# Altium footprint library ICs_VendorSpecific.PcbLib: 247 footprints (part 6 of 19)
Each footprint in its own frame and in the unit in brackets; x right, y up, seen from the top. Pads: shape width x height; smd on the part's side, far side on the other; paste and mask are expansions set on the pad; w line width, h text height; cw(c..) or ccw(c..) is an arc to the next point about the centre after c.
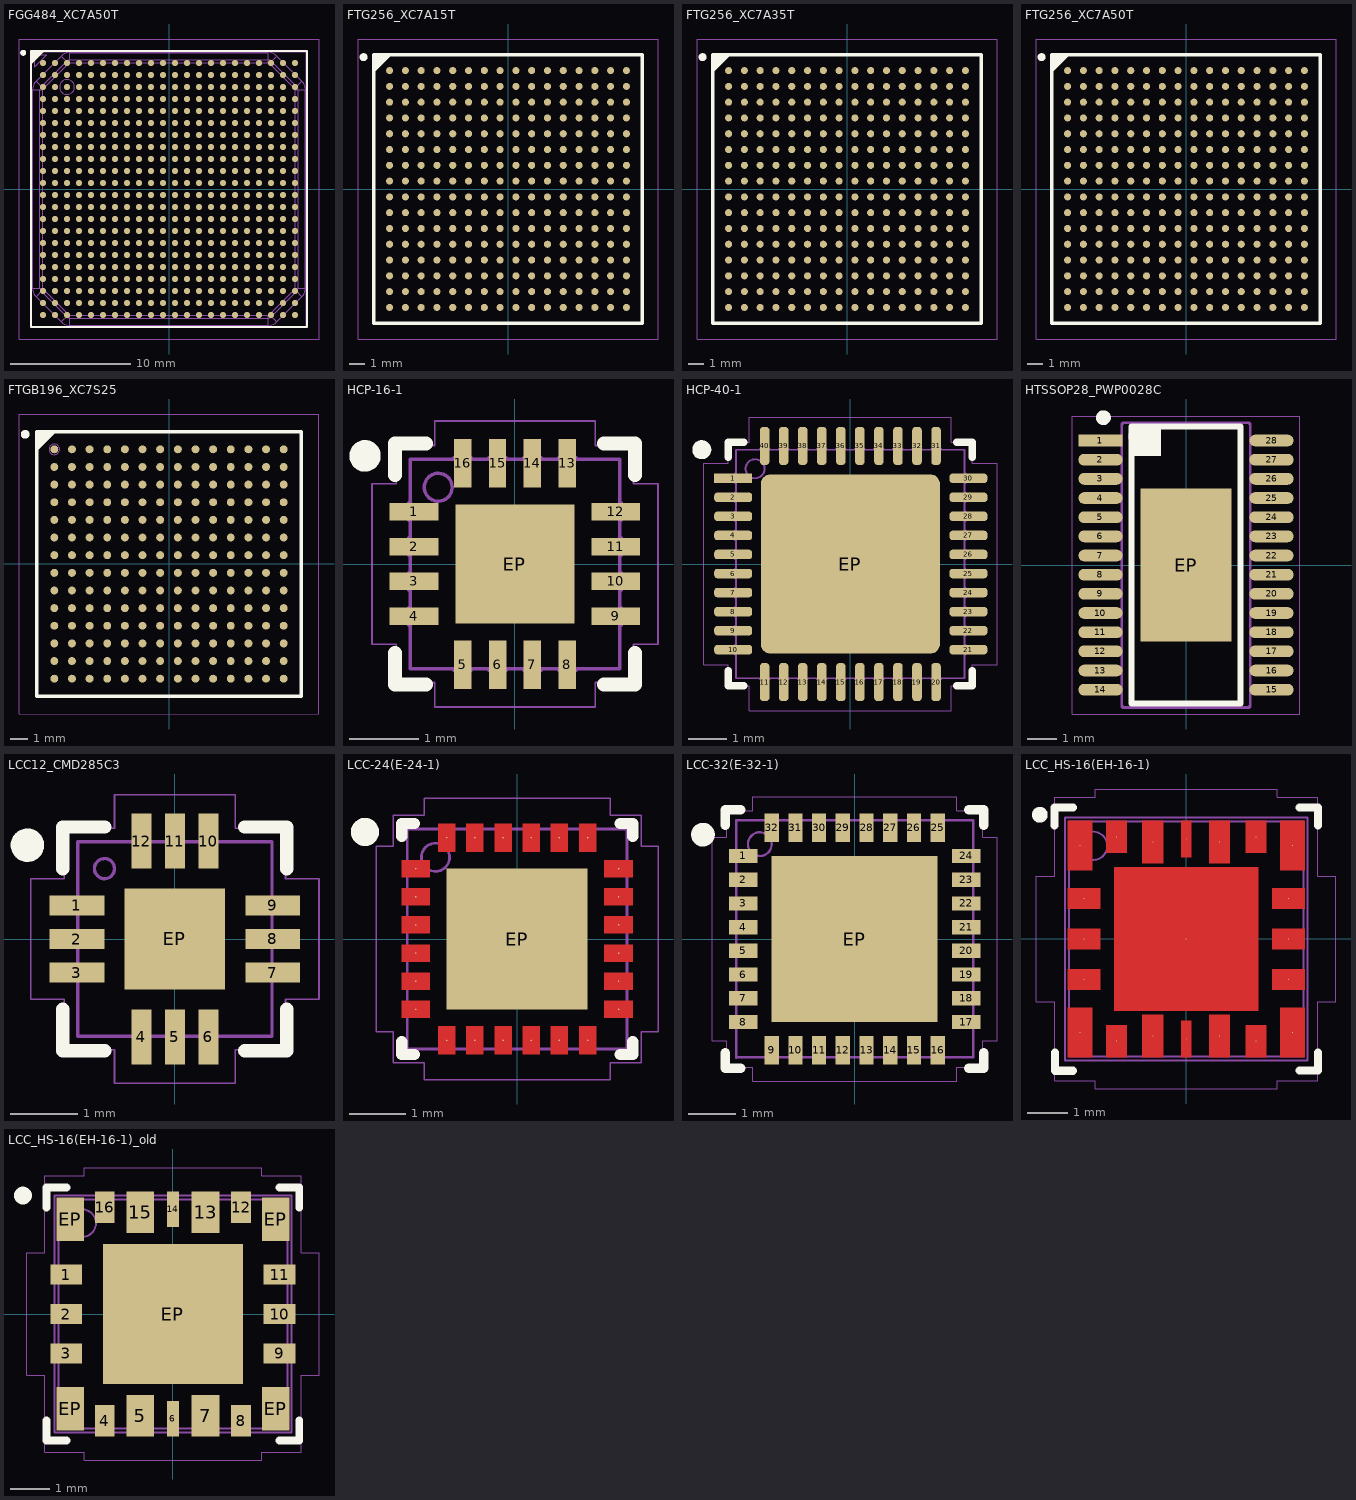
[diagram p5: the footprints below, top view; thin cyan lines are the x and y axes]

## FGG484_XC7A50T [mm] "BGA, 484-Leads, Body 23.00x23.00mmx2.20mm, Pitch 1.00mm"
height 2.2
pads (484):
  round 0.5 smd mask+0.05: A1(-10.5,10.5) A2(-9.5,10.5) A3(-8.5,10.5) A4(-7.5,10.5) A5(-6.5,10.5) A6(-5.5,10.5) A7(-4.5,10.5) A8(-3.5,10.5) A9(-2.5,10.5) A10(-1.5,10.5) A11(-0.5,10.5) A12(0.5,10.5) A13(1.5,10.5) A14(2.5,10.5) A15(3.5,10.5) A16(4.5,10.5) A17(5.5,10.5) A18(6.5,10.5) A19(7.5,10.5) A20(8.5,10.5) A21(9.5,10.5) A22(10.5,10.5) AA1(-10.5,-9.5) AA2(-9.5,-9.5) AA3(-8.5,-9.5) AA4(-7.5,-9.5) AA5(-6.5,-9.5) AA6(-5.5,-9.5) AA7(-4.5,-9.5) AA8(-3.5,-9.5) AA9(-2.5,-9.5) AA10(-1.5,-9.5) AA11(-0.5,-9.5) AA12(0.5,-9.5) AA13(1.5,-9.5) AA14(2.5,-9.5) AA15(3.5,-9.5) AA16(4.5,-9.5) AA17(5.5,-9.5) AA18(6.5,-9.5) AA19(7.5,-9.5) AA20(8.5,-9.5) AA21(9.5,-9.5) AA22(10.5,-9.5) AB1(-10.5,-10.5) AB2(-9.5,-10.5) AB3(-8.5,-10.5) AB4(-7.5,-10.5) AB5(-6.5,-10.5) AB6(-5.5,-10.5) AB7(-4.5,-10.5) AB8(-3.5,-10.5) AB9(-2.5,-10.5) AB10(-1.5,-10.5) AB11(-0.5,-10.5) AB12(0.5,-10.5) AB13(1.5,-10.5) AB14(2.5,-10.5) AB15(3.5,-10.5) AB16(4.5,-10.5) AB17(5.5,-10.5) AB18(6.5,-10.5) AB19(7.5,-10.5) AB20(8.5,-10.5) AB21(9.5,-10.5) AB22(10.5,-10.5) B1(-10.5,9.5) B2(-9.5,9.5) B3(-8.5,9.5) B4(-7.5,9.5) B5(-6.5,9.5) B6(-5.5,9.5) B7(-4.5,9.5) B8(-3.5,9.5) B9(-2.5,9.5) B10(-1.5,9.5) B11(-0.5,9.5) B12(0.5,9.5) B13(1.5,9.5) B14(2.5,9.5) B15(3.5,9.5) B16(4.5,9.5) B17(5.5,9.5) B18(6.5,9.5) B19(7.5,9.5) B20(8.5,9.5) B21(9.5,9.5) B22(10.5,9.5) C1(-10.5,8.5) C2(-9.5,8.5) C3(-8.5,8.5) C4(-7.5,8.5) C5(-6.5,8.5) C6(-5.5,8.5) C7(-4.5,8.5) C8(-3.5,8.5) C9(-2.5,8.5) C10(-1.5,8.5) C11(-0.5,8.5) C12(0.5,8.5) C13(1.5,8.5) C14(2.5,8.5) C15(3.5,8.5) C16(4.5,8.5) C17(5.5,8.5) C18(6.5,8.5) C19(7.5,8.5) C20(8.5,8.5) C21(9.5,8.5) C22(10.5,8.5) D1(-10.5,7.5) D2(-9.5,7.5) D3(-8.5,7.5) D4(-7.5,7.5) D5(-6.5,7.5) D6(-5.5,7.5) D7(-4.5,7.5) D8(-3.5,7.5) D9(-2.5,7.5) D10(-1.5,7.5) D11(-0.5,7.5) D12(0.5,7.5) D13(1.5,7.5) D14(2.5,7.5) D15(3.5,7.5) D16(4.5,7.5) D17(5.5,7.5) D18(6.5,7.5) D19(7.5,7.5) D20(8.5,7.5) D21(9.5,7.5) D22(10.5,7.5) E1(-10.5,6.5) E2(-9.5,6.5) E3(-8.5,6.5) E4(-7.5,6.5) E5(-6.5,6.5) E6(-5.5,6.5) E7(-4.5,6.5) E8(-3.5,6.5) E9(-2.5,6.5) E10(-1.5,6.5) E11(-0.5,6.5) E12(0.5,6.5) E13(1.5,6.5) E14(2.5,6.5) E15(3.5,6.5) E16(4.5,6.5) E17(5.5,6.5) E18(6.5,6.5) E19(7.5,6.5) E20(8.5,6.5) E21(9.5,6.5) E22(10.5,6.5) F1(-10.5,5.5) F2(-9.5,5.5) F3(-8.5,5.5) F4(-7.5,5.5) F5(-6.5,5.5) F6(-5.5,5.5) F7(-4.5,5.5) F8(-3.5,5.5) F9(-2.5,5.5) F10(-1.5,5.5) F11(-0.5,5.5) F12(0.5,5.5) F13(1.5,5.5) F14(2.5,5.5) F15(3.5,5.5) F16(4.5,5.5) F17(5.5,5.5) F18(6.5,5.5) F19(7.5,5.5) F20(8.5,5.5) F21(9.5,5.5) F22(10.5,5.5) G1(-10.5,4.5) G2(-9.5,4.5) G3(-8.5,4.5) G4(-7.5,4.5) G5(-6.5,4.5) G6(-5.5,4.5) G7(-4.5,4.5) G8(-3.5,4.5) G9(-2.5,4.5) G10(-1.5,4.5) G11(-0.5,4.5) G12(0.5,4.5) G13(1.5,4.5) G14(2.5,4.5) G15(3.5,4.5) G16(4.5,4.5) G17(5.5,4.5) G18(6.5,4.5) G19(7.5,4.5) G20(8.5,4.5) G21(9.5,4.5) G22(10.5,4.5) H1(-10.5,3.5) H2(-9.5,3.5) H3(-8.5,3.5) H4(-7.5,3.5) H5(-6.5,3.5) H6(-5.5,3.5) H7(-4.5,3.5) H8(-3.5,3.5) H9(-2.5,3.5) H10(-1.5,3.5) H11(-0.5,3.5) H12(0.5,3.5) H13(1.5,3.5) H14(2.5,3.5) H15(3.5,3.5) H16(4.5,3.5) H17(5.5,3.5) H18(6.5,3.5) H19(7.5,3.5) H20(8.5,3.5) H21(9.5,3.5) H22(10.5,3.5) J1(-10.5,2.5) J2(-9.5,2.5) J3(-8.5,2.5) J4(-7.5,2.5) J5(-6.5,2.5) J6(-5.5,2.5) J7(-4.5,2.5) J8(-3.5,2.5) J9(-2.5,2.5) J10(-1.5,2.5) J11(-0.5,2.5) J12(0.5,2.5) J13(1.5,2.5) J14(2.5,2.5) J15(3.5,2.5) J16(4.5,2.5) J17(5.5,2.5) J18(6.5,2.5) J19(7.5,2.5) J20(8.5,2.5) J21(9.5,2.5) J22(10.5,2.5) K1(-10.5,1.5) K2(-9.5,1.5) K3(-8.5,1.5) K4(-7.5,1.5) K5(-6.5,1.5) K6(-5.5,1.5) K7(-4.5,1.5) K8(-3.5,1.5) K9(-2.5,1.5) K10(-1.5,1.5) K11(-0.5,1.5) K12(0.5,1.5) K13(1.5,1.5) K14(2.5,1.5) K15(3.5,1.5) K16(4.5,1.5) K17(5.5,1.5) K18(6.5,1.5) K19(7.5,1.5) K20(8.5,1.5) K21(9.5,1.5) K22(10.5,1.5) L1(-10.5,0.5) L2(-9.5,0.5) L3(-8.5,0.5) L4(-7.5,0.5) L5(-6.5,0.5) L6(-5.5,0.5) L7(-4.5,0.5) L8(-3.5,0.5) L9(-2.5,0.5) L10(-1.5,0.5) L11(-0.5,0.5) L12(0.5,0.5) L13(1.5,0.5) L14(2.5,0.5) L15(3.5,0.5) L16(4.5,0.5) L17(5.5,0.5) L18(6.5,0.5) L19(7.5,0.5) L20(8.5,0.5) L21(9.5,0.5) L22(10.5,0.5) M1(-10.5,-0.5) M2(-9.5,-0.5) M3(-8.5,-0.5) M4(-7.5,-0.5) M5(-6.5,-0.5) M6(-5.5,-0.5) M7(-4.5,-0.5) M8(-3.5,-0.5) M9(-2.5,-0.5) M10(-1.5,-0.5) M11(-0.5,-0.5) M12(0.5,-0.5) M13(1.5,-0.5) M14(2.5,-0.5) M15(3.5,-0.5) M16(4.5,-0.5) M17(5.5,-0.5) M18(6.5,-0.5) M19(7.5,-0.5) M20(8.5,-0.5) M21(9.5,-0.5) M22(10.5,-0.5) N1(-10.5,-1.5) N2(-9.5,-1.5) N3(-8.5,-1.5) N4(-7.5,-1.5) N5(-6.5,-1.5) N6(-5.5,-1.5) N7(-4.5,-1.5) N8(-3.5,-1.5) N9(-2.5,-1.5) N10(-1.5,-1.5) N11(-0.5,-1.5) N12(0.5,-1.5) N13(1.5,-1.5) N14(2.5,-1.5) N15(3.5,-1.5) N16(4.5,-1.5) N17(5.5,-1.5) N18(6.5,-1.5) N19(7.5,-1.5) N20(8.5,-1.5) N21(9.5,-1.5) N22(10.5,-1.5) P1(-10.5,-2.5) P2(-9.5,-2.5) P3(-8.5,-2.5) P4(-7.5,-2.5) P5(-6.5,-2.5) P6(-5.5,-2.5) P7(-4.5,-2.5) P8(-3.5,-2.5) P9(-2.5,-2.5) P10(-1.5,-2.5) P11(-0.5,-2.5) P12(0.5,-2.5) P13(1.5,-2.5) P14(2.5,-2.5) P15(3.5,-2.5) P16(4.5,-2.5) P17(5.5,-2.5) P18(6.5,-2.5) P19(7.5,-2.5) P20(8.5,-2.5) P21(9.5,-2.5) P22(10.5,-2.5) R1(-10.5,-3.5) R2(-9.5,-3.5) R3(-8.5,-3.5) R4(-7.5,-3.5) R5(-6.5,-3.5) R6(-5.5,-3.5) R7(-4.5,-3.5) R8(-3.5,-3.5) R9(-2.5,-3.5) R10(-1.5,-3.5) R11(-0.5,-3.5) R12(0.5,-3.5) R13(1.5,-3.5) R14(2.5,-3.5) R15(3.5,-3.5) R16(4.5,-3.5) R17(5.5,-3.5) R18(6.5,-3.5) R19(7.5,-3.5) R20(8.5,-3.5) R21(9.5,-3.5) R22(10.5,-3.5) T1(-10.5,-4.5) T2(-9.5,-4.5) T3(-8.5,-4.5) T4(-7.5,-4.5) T5(-6.5,-4.5) T6(-5.5,-4.5) T7(-4.5,-4.5) T8(-3.5,-4.5) T9(-2.5,-4.5) T10(-1.5,-4.5) T11(-0.5,-4.5) T12(0.5,-4.5) T13(1.5,-4.5) T14(2.5,-4.5) T15(3.5,-4.5) T16(4.5,-4.5) T17(5.5,-4.5) T18(6.5,-4.5) T19(7.5,-4.5) T20(8.5,-4.5) T21(9.5,-4.5) T22(10.5,-4.5) U1(-10.5,-5.5) U2(-9.5,-5.5) U3(-8.5,-5.5) U4(-7.5,-5.5) U5(-6.5,-5.5) U6(-5.5,-5.5) U7(-4.5,-5.5) U8(-3.5,-5.5) U9(-2.5,-5.5) U10(-1.5,-5.5) U11(-0.5,-5.5) U12(0.5,-5.5) U13(1.5,-5.5) U14(2.5,-5.5) U15(3.5,-5.5) U16(4.5,-5.5) U17(5.5,-5.5) U18(6.5,-5.5) U19(7.5,-5.5) U20(8.5,-5.5) U21(9.5,-5.5) U22(10.5,-5.5) V1(-10.5,-6.5) V2(-9.5,-6.5) V3(-8.5,-6.5) V4(-7.5,-6.5) V5(-6.5,-6.5) V6(-5.5,-6.5) V7(-4.5,-6.5) V8(-3.5,-6.5) V9(-2.5,-6.5) V10(-1.5,-6.5) V11(-0.5,-6.5) V12(0.5,-6.5) V13(1.5,-6.5) V14(2.5,-6.5) V15(3.5,-6.5) V16(4.5,-6.5) V17(5.5,-6.5) V18(6.5,-6.5) V19(7.5,-6.5) V20(8.5,-6.5) V21(9.5,-6.5) V22(10.5,-6.5) W1(-10.5,-7.5) W2(-9.5,-7.5) W3(-8.5,-7.5) W4(-7.5,-7.5) W5(-6.5,-7.5) W6(-5.5,-7.5) W7(-4.5,-7.5) W8(-3.5,-7.5) W9(-2.5,-7.5) W10(-1.5,-7.5) W11(-0.5,-7.5) W12(0.5,-7.5) W13(1.5,-7.5) W14(2.5,-7.5) W15(3.5,-7.5) W16(4.5,-7.5) W17(5.5,-7.5) W18(6.5,-7.5) W19(7.5,-7.5) W20(8.5,-7.5) W21(9.5,-7.5) W22(10.5,-7.5) Y1(-10.5,-8.5) Y2(-9.5,-8.5) Y3(-8.5,-8.5) Y4(-7.5,-8.5) Y5(-6.5,-8.5) Y6(-5.5,-8.5) Y7(-4.5,-8.5) Y8(-3.5,-8.5) Y9(-2.5,-8.5) Y10(-1.5,-8.5) Y11(-0.5,-8.5) Y12(0.5,-8.5) Y13(1.5,-8.5) Y14(2.5,-8.5) Y15(3.5,-8.5) Y16(4.5,-8.5) Y17(5.5,-8.5) Y18(6.5,-8.5) Y19(7.5,-8.5) Y20(8.5,-8.5) Y21(9.5,-8.5) Y22(10.5,-8.5)
Top Overlay:
  circle w0.25: c-12.15,11.35 r0.125
  region: -10.5,11.5 -11.5,10.5 -11.5,11.5
  lines w0.2: -11.5,10.5 -10.5,11.5 ; -11.5,-11.5 11.5,-11.5 11.5,11.5 -11.5,11.5 -11.5,-11.5
Top Courtyard:
  lines w0.025: -12.5,-12.5 12.5,-12.5 12.5,12.5 -12.5,12.5 -12.5,-12.5
Top Assembly:
  circle w0.05: c-8.5,8.5 r0.625
  lines w0.05: -11.5,-11.5 11.5,-11.5 ; -11.5,-11.5 -11.45,-11.45 ; -11.5,-11.5 -11.5,11.5 ; -11.5,11.5 11.5,11.5 ; -11.5,11.5 -11.45,11.45 ; -11.45,-11.45 11.45,-11.45 ; -11.45,-11.45 -11.45,11.45 ; -11.45,11.45 11.45,11.45 ; -11.375,-8.261 ccw(c-10.375,-8.261) -11.082,-8.968 ; -11.375,-8.261 -11.375,8.261 ; -11.375,-8.261 -10.509,-8.261 ; -11.375,8.261 cw(c-10.375,8.261) -11.082,8.968 ; -11.375,8.261 -10.509,8.261 ; -11.082,-8.968 -8.968,-11.082 ; -11.082,-8.968 -10.47,-8.356 ; -11.082,8.968 -8.968,11.082 ; -11.082,8.968 -10.47,8.356 ; -10.509,-8.261 ccw(c-10.375,-8.261) -10.47,-8.356 ; -10.509,-8.261 -10.509,8.261 ; -10.509,8.261 cw(c-10.375,8.261) -10.47,8.356 ; -10.47,-8.356 -8.356,-10.47 ; -10.47,8.356 -8.356,10.47 ; -8.968,-11.082 ccw(c-8.261,-10.375) -8.261,-11.375 ; -8.968,-11.082 -8.356,-10.47 ; -8.968,11.082 cw(c-8.261,10.375) -8.261,11.375 ; -8.968,11.082 -8.356,10.47 ; -8.356,-10.47 ccw(c-8.261,-10.375) -8.261,-10.509 ; -8.356,10.47 cw(c-8.261,10.375) -8.261,10.509 ; -8.261,-11.375 8.261,-11.375 ; -8.261,-11.375 -8.261,-10.509 ; -8.261,-10.509 8.261,-10.509 ; -8.261,10.509 -8.261,11.375 ; -8.261,10.509 8.261,10.509 ; -8.261,11.375 8.261,11.375 ; 8.261,-11.375 ccw(c8.261,-10.375) 8.968,-11.082 ; 8.261,-11.375 8.261,-10.509 ; 8.261,-10.509 ccw(c8.261,-10.375) 8.356,-10.47 ; 8.261,10.509 cw(c8.261,10.375) 8.356,10.47 ; 8.261,10.509 8.261,11.375 ; 8.261,11.375 cw(c8.261,10.375) 8.968,11.082 ; 8.356,-10.47 8.968,-11.082 ; 8.356,-10.47 10.47,-8.356 ; 8.356,10.47 8.968,11.082 ; 8.356,10.47 10.47,8.356 ; 8.968,-11.082 11.082,-8.968 ; 8.968,11.082 11.082,8.968 ; 10.47,-8.356 ccw(c10.375,-8.261) 10.509,-8.261 ; 10.47,-8.356 11.082,-8.968 ; 10.47,8.356 cw(c10.375,8.261) 10.509,8.261 ; 10.47,8.356 11.082,8.968 ; 10.509,-8.261 11.375,-8.261 ; 10.509,-8.261 10.509,8.261 ; 10.509,8.261 11.375,8.261 ; 11.082,-8.968 ccw(c10.375,-8.261) 11.375,-8.261 ; 11.082,8.968 cw(c10.375,8.261) 11.375,8.261 ; 11.375,-8.261 11.375,8.261 ; 11.45,-11.45 11.5,-11.5 ; 11.45,-11.45 11.45,11.45 ; 11.45,11.45 11.5,11.5 ; 11.5,-11.5 11.5,11.5 ; -11.2,10.2 -11.2,11.2 -10.2,11.2 -11.2,10.2 ; -10.769,-8.261 ccw(c-10.375,-8.261) -10.653,-8.539 -8.539,-10.653 ccw(c-8.261,-10.375) -8.261,-10.769 8.261,-10.769 ccw(c8.261,-10.375) 8.539,-10.653 10.653,-8.539 ccw(c10.375,-8.261) 10.769,-8.261 10.769,8.261 ccw(c10.375,8.261) 10.653,8.539 8.539,10.653 ccw(c8.261,10.375) 8.261,10.769 -8.261,10.769 ccw(c-8.261,10.375) -8.539,10.653 -10.653,8.539 ccw(c-10.375,8.261) -10.769,8.261 -10.769,-8.261
  text ".Designator" at -6.763,-0.679 h3
3D body "XC7A50T_FGG484.x_t": height 2.2, standoff 0, extent -11.5,-11.5 11.5,11.5

## FTG256_XC7A15T [mm] "BGA, 256-Leads, Body 17.00x17.00mmx1.55mm, Pitch 1.00mm"
height 1.55
pads (256):
  round 0.45 smd mask+0.05: A1(-7.5,7.5) A2(-6.5,7.5) A3(-5.5,7.5) A4(-4.5,7.5) A5(-3.5,7.5) A6(-2.5,7.5) A7(-1.5,7.5) A8(-0.5,7.5) A9(0.5,7.5) A10(1.5,7.5) A11(2.5,7.5) A12(3.5,7.5) A13(4.5,7.5) A14(5.5,7.5) A15(6.5,7.5) A16(7.5,7.5) B1(-7.5,6.5) B2(-6.5,6.5) B3(-5.5,6.5) B4(-4.5,6.5) B5(-3.5,6.5) B6(-2.5,6.5) B7(-1.5,6.5) B8(-0.5,6.5) B9(0.5,6.5) B10(1.5,6.5) B11(2.5,6.5) B12(3.5,6.5) B13(4.5,6.5) B14(5.5,6.5) B15(6.5,6.5) B16(7.5,6.5) C1(-7.5,5.5) C2(-6.5,5.5) C3(-5.5,5.5) C4(-4.5,5.5) C5(-3.5,5.5) C6(-2.5,5.5) C7(-1.5,5.5) C8(-0.5,5.5) C9(0.5,5.5) C10(1.5,5.5) C11(2.5,5.5) C12(3.5,5.5) C13(4.5,5.5) C14(5.5,5.5) C15(6.5,5.5) C16(7.5,5.5) D1(-7.5,4.5) D2(-6.5,4.5) D3(-5.5,4.5) D4(-4.5,4.5) D5(-3.5,4.5) D6(-2.5,4.5) D7(-1.5,4.5) D8(-0.5,4.5) D9(0.5,4.5) D10(1.5,4.5) D11(2.5,4.5) D12(3.5,4.5) D13(4.5,4.5) D14(5.5,4.5) D15(6.5,4.5) D16(7.5,4.5) E1(-7.5,3.5) E2(-6.5,3.5) E3(-5.5,3.5) E4(-4.5,3.5) E5(-3.5,3.5) E6(-2.5,3.5) E7(-1.5,3.5) E8(-0.5,3.5) E9(0.5,3.5) E10(1.5,3.5) E11(2.5,3.5) E12(3.5,3.5) E13(4.5,3.5) E14(5.5,3.5) E15(6.5,3.5) E16(7.5,3.5) F1(-7.5,2.5) F2(-6.5,2.5) F3(-5.5,2.5) F4(-4.5,2.5) F5(-3.5,2.5) F6(-2.5,2.5) F7(-1.5,2.5) F8(-0.5,2.5) F9(0.5,2.5) F10(1.5,2.5) F11(2.5,2.5) F12(3.5,2.5) F13(4.5,2.5) F14(5.5,2.5) F15(6.5,2.5) F16(7.5,2.5) G1(-7.5,1.5) G2(-6.5,1.5) G3(-5.5,1.5) G4(-4.5,1.5) G5(-3.5,1.5) G6(-2.5,1.5) G7(-1.5,1.5) G8(-0.5,1.5) G9(0.5,1.5) G10(1.5,1.5) G11(2.5,1.5) G12(3.5,1.5) G13(4.5,1.5) G14(5.5,1.5) G15(6.5,1.5) G16(7.5,1.5) H1(-7.5,0.5) H2(-6.5,0.5) H3(-5.5,0.5) H4(-4.5,0.5) H5(-3.5,0.5) H6(-2.5,0.5) H7(-1.5,0.5) H8(-0.5,0.5) H9(0.5,0.5) H10(1.5,0.5) H11(2.5,0.5) H12(3.5,0.5) H13(4.5,0.5) H14(5.5,0.5) H15(6.5,0.5) H16(7.5,0.5) J1(-7.5,-0.5) J2(-6.5,-0.5) J3(-5.5,-0.5) J4(-4.5,-0.5) J5(-3.5,-0.5) J6(-2.5,-0.5) J7(-1.5,-0.5) J8(-0.5,-0.5) J9(0.5,-0.5) J10(1.5,-0.5) J11(2.5,-0.5) J12(3.5,-0.5) J13(4.5,-0.5) J14(5.5,-0.5) J15(6.5,-0.5) J16(7.5,-0.5) K1(-7.5,-1.5) K2(-6.5,-1.5) K3(-5.5,-1.5) K4(-4.5,-1.5) K5(-3.5,-1.5) K6(-2.5,-1.5) K7(-1.5,-1.5) K8(-0.5,-1.5) K9(0.5,-1.5) K10(1.5,-1.5) K11(2.5,-1.5) K12(3.5,-1.5) K13(4.5,-1.5) K14(5.5,-1.5) K15(6.5,-1.5) K16(7.5,-1.5) L1(-7.5,-2.5) L2(-6.5,-2.5) L3(-5.5,-2.5) L4(-4.5,-2.5) L5(-3.5,-2.5) L6(-2.5,-2.5) L7(-1.5,-2.5) L8(-0.5,-2.5) L9(0.5,-2.5) L10(1.5,-2.5) L11(2.5,-2.5) L12(3.5,-2.5) L13(4.5,-2.5) L14(5.5,-2.5) L15(6.5,-2.5) L16(7.5,-2.5) M1(-7.5,-3.5) M2(-6.5,-3.5) M3(-5.5,-3.5) M4(-4.5,-3.5) M5(-3.5,-3.5) M6(-2.5,-3.5) M7(-1.5,-3.5) M8(-0.5,-3.5) M9(0.5,-3.5) M10(1.5,-3.5) M11(2.5,-3.5) M12(3.5,-3.5) M13(4.5,-3.5) M14(5.5,-3.5) M15(6.5,-3.5) M16(7.5,-3.5) N1(-7.5,-4.5) N2(-6.5,-4.5) N3(-5.5,-4.5) N4(-4.5,-4.5) N5(-3.5,-4.5) N6(-2.5,-4.5) N7(-1.5,-4.5) N8(-0.5,-4.5) N9(0.5,-4.5) N10(1.5,-4.5) N11(2.5,-4.5) N12(3.5,-4.5) N13(4.5,-4.5) N14(5.5,-4.5) N15(6.5,-4.5) N16(7.5,-4.5) P1(-7.5,-5.5) P2(-6.5,-5.5) P3(-5.5,-5.5) P4(-4.5,-5.5) P5(-3.5,-5.5) P6(-2.5,-5.5) P7(-1.5,-5.5) P8(-0.5,-5.5) P9(0.5,-5.5) P10(1.5,-5.5) P11(2.5,-5.5) P12(3.5,-5.5) P13(4.5,-5.5) P14(5.5,-5.5) P15(6.5,-5.5) P16(7.5,-5.5) R1(-7.5,-6.5) R2(-6.5,-6.5) R3(-5.5,-6.5) R4(-4.5,-6.5) R5(-3.5,-6.5) R6(-2.5,-6.5) R7(-1.5,-6.5) R8(-0.5,-6.5) R9(0.5,-6.5) R10(1.5,-6.5) R11(2.5,-6.5) R12(3.5,-6.5) R13(4.5,-6.5) R14(5.5,-6.5) R15(6.5,-6.5) R16(7.5,-6.5) T1(-7.5,-7.5) T2(-6.5,-7.5) T3(-5.5,-7.5) T4(-4.5,-7.5) T5(-3.5,-7.5) T6(-2.5,-7.5) T7(-1.5,-7.5) T8(-0.5,-7.5) T9(0.5,-7.5) T10(1.5,-7.5) T11(2.5,-7.5) T12(3.5,-7.5) T13(4.5,-7.5) T14(5.5,-7.5) T15(6.5,-7.5) T16(7.5,-7.5)
Top Overlay:
  circle w0.25: c-9.15,8.35 r0.125
  region: -7.5,8.5 -8.5,7.5 -8.5,8.5
  lines w0.2: -8.5,7.5 -7.5,8.5 ; -8.5,-8.5 8.5,-8.5 8.5,8.5 -8.5,8.5 -8.5,-8.5
Top Courtyard:
  lines w0.025: -9.5,-9.5 9.5,-9.5 9.5,9.5 -9.5,9.5 -9.5,-9.5
Top Assembly:
  lines w0.05: -8.5,-8.5 8.5,-8.5 8.5,8.5 -8.5,8.5 -8.5,-8.5
  text ".Designator" at -6.763,-0.679 h3
3D body "FTG256_XC7A15T.x_t": height 1.4, standoff 0, extent -8.5,-8.5 8.5,8.5

## FTG256_XC7A35T [mm] "BGA, 256-Leads, Body 17.00x17.00mmx1.55mm, Pitch 1.00mm"
height 1.55
pads (256):
  round 0.45 smd mask+0.05: A1(-7.5,7.5) A2(-6.5,7.5) A3(-5.5,7.5) A4(-4.5,7.5) A5(-3.5,7.5) A6(-2.5,7.5) A7(-1.5,7.5) A8(-0.5,7.5) A9(0.5,7.5) A10(1.5,7.5) A11(2.5,7.5) A12(3.5,7.5) A13(4.5,7.5) A14(5.5,7.5) A15(6.5,7.5) A16(7.5,7.5) B1(-7.5,6.5) B2(-6.5,6.5) B3(-5.5,6.5) B4(-4.5,6.5) B5(-3.5,6.5) B6(-2.5,6.5) B7(-1.5,6.5) B8(-0.5,6.5) B9(0.5,6.5) B10(1.5,6.5) B11(2.5,6.5) B12(3.5,6.5) B13(4.5,6.5) B14(5.5,6.5) B15(6.5,6.5) B16(7.5,6.5) C1(-7.5,5.5) C2(-6.5,5.5) C3(-5.5,5.5) C4(-4.5,5.5) C5(-3.5,5.5) C6(-2.5,5.5) C7(-1.5,5.5) C8(-0.5,5.5) C9(0.5,5.5) C10(1.5,5.5) C11(2.5,5.5) C12(3.5,5.5) C13(4.5,5.5) C14(5.5,5.5) C15(6.5,5.5) C16(7.5,5.5) D1(-7.5,4.5) D2(-6.5,4.5) D3(-5.5,4.5) D4(-4.5,4.5) D5(-3.5,4.5) D6(-2.5,4.5) D7(-1.5,4.5) D8(-0.5,4.5) D9(0.5,4.5) D10(1.5,4.5) D11(2.5,4.5) D12(3.5,4.5) D13(4.5,4.5) D14(5.5,4.5) D15(6.5,4.5) D16(7.5,4.5) E1(-7.5,3.5) E2(-6.5,3.5) E3(-5.5,3.5) E4(-4.5,3.5) E5(-3.5,3.5) E6(-2.5,3.5) E7(-1.5,3.5) E8(-0.5,3.5) E9(0.5,3.5) E10(1.5,3.5) E11(2.5,3.5) E12(3.5,3.5) E13(4.5,3.5) E14(5.5,3.5) E15(6.5,3.5) E16(7.5,3.5) F1(-7.5,2.5) F2(-6.5,2.5) F3(-5.5,2.5) F4(-4.5,2.5) F5(-3.5,2.5) F6(-2.5,2.5) F7(-1.5,2.5) F8(-0.5,2.5) F9(0.5,2.5) F10(1.5,2.5) F11(2.5,2.5) F12(3.5,2.5) F13(4.5,2.5) F14(5.5,2.5) F15(6.5,2.5) F16(7.5,2.5) G1(-7.5,1.5) G2(-6.5,1.5) G3(-5.5,1.5) G4(-4.5,1.5) G5(-3.5,1.5) G6(-2.5,1.5) G7(-1.5,1.5) G8(-0.5,1.5) G9(0.5,1.5) G10(1.5,1.5) G11(2.5,1.5) G12(3.5,1.5) G13(4.5,1.5) G14(5.5,1.5) G15(6.5,1.5) G16(7.5,1.5) H1(-7.5,0.5) H2(-6.5,0.5) H3(-5.5,0.5) H4(-4.5,0.5) H5(-3.5,0.5) H6(-2.5,0.5) H7(-1.5,0.5) H8(-0.5,0.5) H9(0.5,0.5) H10(1.5,0.5) H11(2.5,0.5) H12(3.5,0.5) H13(4.5,0.5) H14(5.5,0.5) H15(6.5,0.5) H16(7.5,0.5) J1(-7.5,-0.5) J2(-6.5,-0.5) J3(-5.5,-0.5) J4(-4.5,-0.5) J5(-3.5,-0.5) J6(-2.5,-0.5) J7(-1.5,-0.5) J8(-0.5,-0.5) J9(0.5,-0.5) J10(1.5,-0.5) J11(2.5,-0.5) J12(3.5,-0.5) J13(4.5,-0.5) J14(5.5,-0.5) J15(6.5,-0.5) J16(7.5,-0.5) K1(-7.5,-1.5) K2(-6.5,-1.5) K3(-5.5,-1.5) K4(-4.5,-1.5) K5(-3.5,-1.5) K6(-2.5,-1.5) K7(-1.5,-1.5) K8(-0.5,-1.5) K9(0.5,-1.5) K10(1.5,-1.5) K11(2.5,-1.5) K12(3.5,-1.5) K13(4.5,-1.5) K14(5.5,-1.5) K15(6.5,-1.5) K16(7.5,-1.5) L1(-7.5,-2.5) L2(-6.5,-2.5) L3(-5.5,-2.5) L4(-4.5,-2.5) L5(-3.5,-2.5) L6(-2.5,-2.5) L7(-1.5,-2.5) L8(-0.5,-2.5) L9(0.5,-2.5) L10(1.5,-2.5) L11(2.5,-2.5) L12(3.5,-2.5) L13(4.5,-2.5) L14(5.5,-2.5) L15(6.5,-2.5) L16(7.5,-2.5) M1(-7.5,-3.5) M2(-6.5,-3.5) M3(-5.5,-3.5) M4(-4.5,-3.5) M5(-3.5,-3.5) M6(-2.5,-3.5) M7(-1.5,-3.5) M8(-0.5,-3.5) M9(0.5,-3.5) M10(1.5,-3.5) M11(2.5,-3.5) M12(3.5,-3.5) M13(4.5,-3.5) M14(5.5,-3.5) M15(6.5,-3.5) M16(7.5,-3.5) N1(-7.5,-4.5) N2(-6.5,-4.5) N3(-5.5,-4.5) N4(-4.5,-4.5) N5(-3.5,-4.5) N6(-2.5,-4.5) N7(-1.5,-4.5) N8(-0.5,-4.5) N9(0.5,-4.5) N10(1.5,-4.5) N11(2.5,-4.5) N12(3.5,-4.5) N13(4.5,-4.5) N14(5.5,-4.5) N15(6.5,-4.5) N16(7.5,-4.5) P1(-7.5,-5.5) P2(-6.5,-5.5) P3(-5.5,-5.5) P4(-4.5,-5.5) P5(-3.5,-5.5) P6(-2.5,-5.5) P7(-1.5,-5.5) P8(-0.5,-5.5) P9(0.5,-5.5) P10(1.5,-5.5) P11(2.5,-5.5) P12(3.5,-5.5) P13(4.5,-5.5) P14(5.5,-5.5) P15(6.5,-5.5) P16(7.5,-5.5) R1(-7.5,-6.5) R2(-6.5,-6.5) R3(-5.5,-6.5) R4(-4.5,-6.5) R5(-3.5,-6.5) R6(-2.5,-6.5) R7(-1.5,-6.5) R8(-0.5,-6.5) R9(0.5,-6.5) R10(1.5,-6.5) R11(2.5,-6.5) R12(3.5,-6.5) R13(4.5,-6.5) R14(5.5,-6.5) R15(6.5,-6.5) R16(7.5,-6.5) T1(-7.5,-7.5) T2(-6.5,-7.5) T3(-5.5,-7.5) T4(-4.5,-7.5) T5(-3.5,-7.5) T6(-2.5,-7.5) T7(-1.5,-7.5) T8(-0.5,-7.5) T9(0.5,-7.5) T10(1.5,-7.5) T11(2.5,-7.5) T12(3.5,-7.5) T13(4.5,-7.5) T14(5.5,-7.5) T15(6.5,-7.5) T16(7.5,-7.5)
Top Overlay:
  circle w0.25: c-9.15,8.35 r0.125
  region: -7.5,8.5 -8.5,7.5 -8.5,8.5
  lines w0.2: -8.5,7.5 -7.5,8.5 ; -8.5,-8.5 -8.5,8.5 8.5,8.5 8.5,-8.5 -8.5,-8.5
Top Courtyard:
  lines w0.025: -9.5,-9.5 -9.5,9.5 9.5,9.5 9.5,-9.5 -9.5,-9.5
Top Assembly:
  lines w0.05: -8.5,-8.5 -8.5,8.5 8.5,8.5 8.5,-8.5 -8.5,-8.5
  text ".Designator" at -6.763,-0.679 h3
3D body "FTG256_XC7A35T.x_t": height 1.4, standoff 0, extent -8.5,-8.5 8.5,8.5

## FTG256_XC7A50T [mm] "BGA, 256-Leads, Body 17.00x17.00mmx1.55mm, Pitch 1.00mm"
height 1.55
pads (256):
  round 0.45 smd mask+0.05: A1(-7.5,7.5) A2(-6.5,7.5) A3(-5.5,7.5) A4(-4.5,7.5) A5(-3.5,7.5) A6(-2.5,7.5) A7(-1.5,7.5) A8(-0.5,7.5) A9(0.5,7.5) A10(1.5,7.5) A11(2.5,7.5) A12(3.5,7.5) A13(4.5,7.5) A14(5.5,7.5) A15(6.5,7.5) A16(7.5,7.5) B1(-7.5,6.5) B2(-6.5,6.5) B3(-5.5,6.5) B4(-4.5,6.5) B5(-3.5,6.5) B6(-2.5,6.5) B7(-1.5,6.5) B8(-0.5,6.5) B9(0.5,6.5) B10(1.5,6.5) B11(2.5,6.5) B12(3.5,6.5) B13(4.5,6.5) B14(5.5,6.5) B15(6.5,6.5) B16(7.5,6.5) C1(-7.5,5.5) C2(-6.5,5.5) C3(-5.5,5.5) C4(-4.5,5.5) C5(-3.5,5.5) C6(-2.5,5.5) C7(-1.5,5.5) C8(-0.5,5.5) C9(0.5,5.5) C10(1.5,5.5) C11(2.5,5.5) C12(3.5,5.5) C13(4.5,5.5) C14(5.5,5.5) C15(6.5,5.5) C16(7.5,5.5) D1(-7.5,4.5) D2(-6.5,4.5) D3(-5.5,4.5) D4(-4.5,4.5) D5(-3.5,4.5) D6(-2.5,4.5) D7(-1.5,4.5) D8(-0.5,4.5) D9(0.5,4.5) D10(1.5,4.5) D11(2.5,4.5) D12(3.5,4.5) D13(4.5,4.5) D14(5.5,4.5) D15(6.5,4.5) D16(7.5,4.5) E1(-7.5,3.5) E2(-6.5,3.5) E3(-5.5,3.5) E4(-4.5,3.5) E5(-3.5,3.5) E6(-2.5,3.5) E7(-1.5,3.5) E8(-0.5,3.5) E9(0.5,3.5) E10(1.5,3.5) E11(2.5,3.5) E12(3.5,3.5) E13(4.5,3.5) E14(5.5,3.5) E15(6.5,3.5) E16(7.5,3.5) F1(-7.5,2.5) F2(-6.5,2.5) F3(-5.5,2.5) F4(-4.5,2.5) F5(-3.5,2.5) F6(-2.5,2.5) F7(-1.5,2.5) F8(-0.5,2.5) F9(0.5,2.5) F10(1.5,2.5) F11(2.5,2.5) F12(3.5,2.5) F13(4.5,2.5) F14(5.5,2.5) F15(6.5,2.5) F16(7.5,2.5) G1(-7.5,1.5) G2(-6.5,1.5) G3(-5.5,1.5) G4(-4.5,1.5) G5(-3.5,1.5) G6(-2.5,1.5) G7(-1.5,1.5) G8(-0.5,1.5) G9(0.5,1.5) G10(1.5,1.5) G11(2.5,1.5) G12(3.5,1.5) G13(4.5,1.5) G14(5.5,1.5) G15(6.5,1.5) G16(7.5,1.5) H1(-7.5,0.5) H2(-6.5,0.5) H3(-5.5,0.5) H4(-4.5,0.5) H5(-3.5,0.5) H6(-2.5,0.5) H7(-1.5,0.5) H8(-0.5,0.5) H9(0.5,0.5) H10(1.5,0.5) H11(2.5,0.5) H12(3.5,0.5) H13(4.5,0.5) H14(5.5,0.5) H15(6.5,0.5) H16(7.5,0.5) J1(-7.5,-0.5) J2(-6.5,-0.5) J3(-5.5,-0.5) J4(-4.5,-0.5) J5(-3.5,-0.5) J6(-2.5,-0.5) J7(-1.5,-0.5) J8(-0.5,-0.5) J9(0.5,-0.5) J10(1.5,-0.5) J11(2.5,-0.5) J12(3.5,-0.5) J13(4.5,-0.5) J14(5.5,-0.5) J15(6.5,-0.5) J16(7.5,-0.5) K1(-7.5,-1.5) K2(-6.5,-1.5) K3(-5.5,-1.5) K4(-4.5,-1.5) K5(-3.5,-1.5) K6(-2.5,-1.5) K7(-1.5,-1.5) K8(-0.5,-1.5) K9(0.5,-1.5) K10(1.5,-1.5) K11(2.5,-1.5) K12(3.5,-1.5) K13(4.5,-1.5) K14(5.5,-1.5) K15(6.5,-1.5) K16(7.5,-1.5) L1(-7.5,-2.5) L2(-6.5,-2.5) L3(-5.5,-2.5) L4(-4.5,-2.5) L5(-3.5,-2.5) L6(-2.5,-2.5) L7(-1.5,-2.5) L8(-0.5,-2.5) L9(0.5,-2.5) L10(1.5,-2.5) L11(2.5,-2.5) L12(3.5,-2.5) L13(4.5,-2.5) L14(5.5,-2.5) L15(6.5,-2.5) L16(7.5,-2.5) M1(-7.5,-3.5) M2(-6.5,-3.5) M3(-5.5,-3.5) M4(-4.5,-3.5) M5(-3.5,-3.5) M6(-2.5,-3.5) M7(-1.5,-3.5) M8(-0.5,-3.5) M9(0.5,-3.5) M10(1.5,-3.5) M11(2.5,-3.5) M12(3.5,-3.5) M13(4.5,-3.5) M14(5.5,-3.5) M15(6.5,-3.5) M16(7.5,-3.5) N1(-7.5,-4.5) N2(-6.5,-4.5) N3(-5.5,-4.5) N4(-4.5,-4.5) N5(-3.5,-4.5) N6(-2.5,-4.5) N7(-1.5,-4.5) N8(-0.5,-4.5) N9(0.5,-4.5) N10(1.5,-4.5) N11(2.5,-4.5) N12(3.5,-4.5) N13(4.5,-4.5) N14(5.5,-4.5) N15(6.5,-4.5) N16(7.5,-4.5) P1(-7.5,-5.5) P2(-6.5,-5.5) P3(-5.5,-5.5) P4(-4.5,-5.5) P5(-3.5,-5.5) P6(-2.5,-5.5) P7(-1.5,-5.5) P8(-0.5,-5.5) P9(0.5,-5.5) P10(1.5,-5.5) P11(2.5,-5.5) P12(3.5,-5.5) P13(4.5,-5.5) P14(5.5,-5.5) P15(6.5,-5.5) P16(7.5,-5.5) R1(-7.5,-6.5) R2(-6.5,-6.5) R3(-5.5,-6.5) R4(-4.5,-6.5) R5(-3.5,-6.5) R6(-2.5,-6.5) R7(-1.5,-6.5) R8(-0.5,-6.5) R9(0.5,-6.5) R10(1.5,-6.5) R11(2.5,-6.5) R12(3.5,-6.5) R13(4.5,-6.5) R14(5.5,-6.5) R15(6.5,-6.5) R16(7.5,-6.5) T1(-7.5,-7.5) T2(-6.5,-7.5) T3(-5.5,-7.5) T4(-4.5,-7.5) T5(-3.5,-7.5) T6(-2.5,-7.5) T7(-1.5,-7.5) T8(-0.5,-7.5) T9(0.5,-7.5) T10(1.5,-7.5) T11(2.5,-7.5) T12(3.5,-7.5) T13(4.5,-7.5) T14(5.5,-7.5) T15(6.5,-7.5) T16(7.5,-7.5)
Top Overlay:
  circle w0.25: c-9.15,8.35 r0.125
  region: -7.5,8.5 -8.5,7.5 -8.5,8.5
  lines w0.2: -8.5,7.5 -7.5,8.5 ; -8.5,-8.5 -8.5,8.5 8.5,8.5 8.5,-8.5 -8.5,-8.5
Top Courtyard:
  lines w0.025: -9.5,-9.5 -9.5,9.5 9.5,9.5 9.5,-9.5 -9.5,-9.5
Top Assembly:
  lines w0.05: -8.5,-8.5 -8.5,8.5 8.5,8.5 8.5,-8.5 -8.5,-8.5
  text ".Designator" at -6.763,-0.679 h3
3D body "FTG256_XC7A50T.x_t": height 1.4, standoff 0, extent -8.5,-8.5 8.5,8.5

## FTGB196_XC7S25 [mm] "BGA, 196-Leads, Body 15,00x15,00mmx1,55mm, Pitch 1,00mm"
height 1.46
pads (196):
  round 0.45 smd mask+0.05: A1(-6.5,6.5) A2(-5.5,6.5) A3(-4.5,6.5) A4(-3.5,6.5) A5(-2.5,6.5) A6(-1.5,6.5) A7(-0.5,6.5) A8(0.5,6.5) A9(1.5,6.5) A10(2.5,6.5) A11(3.5,6.5) A12(4.5,6.5) A13(5.5,6.5) A14(6.5,6.5) B1(-6.5,5.5) B2(-5.5,5.5) B3(-4.5,5.5) B4(-3.5,5.5) B5(-2.5,5.5) B6(-1.5,5.5) B7(-0.5,5.5) B8(0.5,5.5) B9(1.5,5.5) B10(2.5,5.5) B11(3.5,5.5) B12(4.5,5.5) B13(5.5,5.5) B14(6.5,5.5) C1(-6.5,4.5) C2(-5.5,4.5) C3(-4.5,4.5) C4(-3.5,4.5) C5(-2.5,4.5) C6(-1.5,4.5) C7(-0.5,4.5) C8(0.5,4.5) C9(1.5,4.5) C10(2.5,4.5) C11(3.5,4.5) C12(4.5,4.5) C13(5.5,4.5) C14(6.5,4.5) D1(-6.5,3.5) D2(-5.5,3.5) D3(-4.5,3.5) D4(-3.5,3.5) D5(-2.5,3.5) D6(-1.5,3.5) D7(-0.5,3.5) D8(0.5,3.5) D9(1.5,3.5) D10(2.5,3.5) D11(3.5,3.5) D12(4.5,3.5) D13(5.5,3.5) D14(6.5,3.5) E1(-6.5,2.5) E2(-5.5,2.5) E3(-4.5,2.5) E4(-3.5,2.5) E5(-2.5,2.5) E6(-1.5,2.5) E7(-0.5,2.5) E8(0.5,2.5) E9(1.5,2.5) E10(2.5,2.5) E11(3.5,2.5) E12(4.5,2.5) E13(5.5,2.5) E14(6.5,2.5) F1(-6.5,1.5) F2(-5.5,1.5) F3(-4.5,1.5) F4(-3.5,1.5) F5(-2.5,1.5) F6(-1.5,1.5) F7(-0.5,1.5) F8(0.5,1.5) F9(1.5,1.5) F10(2.5,1.5) F11(3.5,1.5) F12(4.5,1.5) F13(5.5,1.5) F14(6.5,1.5) G1(-6.5,0.5) G2(-5.5,0.5) G3(-4.5,0.5) G4(-3.5,0.5) G5(-2.5,0.5) G6(-1.5,0.5) G7(-0.5,0.5) G8(0.5,0.5) G9(1.5,0.5) G10(2.5,0.5) G11(3.5,0.5) G12(4.5,0.5) G13(5.5,0.5) G14(6.5,0.5) H1(-6.5,-0.5) H2(-5.5,-0.5) H3(-4.5,-0.5) H4(-3.5,-0.5) H5(-2.5,-0.5) H6(-1.5,-0.5) H7(-0.5,-0.5) H8(0.5,-0.5) H9(1.5,-0.5) H10(2.5,-0.5) H11(3.5,-0.5) H12(4.5,-0.5) H13(5.5,-0.5) H14(6.5,-0.5) J1(-6.5,-1.5) J2(-5.5,-1.5) J3(-4.5,-1.5) J4(-3.5,-1.5) J5(-2.5,-1.5) J6(-1.5,-1.5) J7(-0.5,-1.5) J8(0.5,-1.5) J9(1.5,-1.5) J10(2.5,-1.5) J11(3.5,-1.5) J12(4.5,-1.5) J13(5.5,-1.5) J14(6.5,-1.5) K1(-6.5,-2.5) K2(-5.5,-2.5) K3(-4.5,-2.5) K4(-3.5,-2.5) K5(-2.5,-2.5) K6(-1.5,-2.5) K7(-0.5,-2.5) K8(0.5,-2.5) K9(1.5,-2.5) K10(2.5,-2.5) K11(3.5,-2.5) K12(4.5,-2.5) K13(5.5,-2.5) K14(6.5,-2.5) L1(-6.5,-3.5) L2(-5.5,-3.5) L3(-4.5,-3.5) L4(-3.5,-3.5) L5(-2.5,-3.5) L6(-1.5,-3.5) L7(-0.5,-3.5) L8(0.5,-3.5) L9(1.5,-3.5) L10(2.5,-3.5) L11(3.5,-3.5) L12(4.5,-3.5) L13(5.5,-3.5) L14(6.5,-3.5) M1(-6.5,-4.5) M2(-5.5,-4.5) M3(-4.5,-4.5) M4(-3.5,-4.5) M5(-2.5,-4.5) M6(-1.5,-4.5) M7(-0.5,-4.5) M8(0.5,-4.5) M9(1.5,-4.5) M10(2.5,-4.5) M11(3.5,-4.5) M12(4.5,-4.5) M13(5.5,-4.5) M14(6.5,-4.5) N1(-6.5,-5.5) N2(-5.5,-5.5) N3(-4.5,-5.5) N4(-3.5,-5.5) N5(-2.5,-5.5) N6(-1.5,-5.5) N7(-0.5,-5.5) N8(0.5,-5.5) N9(1.5,-5.5) N10(2.5,-5.5) N11(3.5,-5.5) N12(4.5,-5.5) N13(5.5,-5.5) N14(6.5,-5.5) P1(-6.5,-6.5) P2(-5.5,-6.5) P3(-4.5,-6.5) P4(-3.5,-6.5) P5(-2.5,-6.5) P6(-1.5,-6.5) P7(-0.5,-6.5) P8(0.5,-6.5) P9(1.5,-6.5) P10(2.5,-6.5) P11(3.5,-6.5) P12(4.5,-6.5) P13(5.5,-6.5) P14(6.5,-6.5)
Top Overlay:
  circle w0.25: c-8.15,7.35 r0.125
  region: -6.5,7.5 -7.5,6.5 -7.5,7.5
  lines w0.2: -7.5,6.5 -6.5,7.5 ; -7.5,-7.5 -7.5,7.5 7.5,7.5 7.5,-7.5 -7.5,-7.5
Top Courtyard:
  lines w0.025: -8.5,-8.5 8.5,-8.5 8.5,8.5 -8.5,8.5 -8.5,-8.5
Top Assembly:
  circle w0.05: c-6.5,6.5 r0.3
  lines w0.05: -7.5,-7.5 -7.5,7.5 7.5,7.5 7.5,-7.5 -7.5,-7.5
  text ".Designator" at -6.763,-0.679 h3
3D body "FTGB196.x_t": height 1.91, standoff 0, extent -7.5,-7.5 7.5,7.5

## HCP-16-1 [mm] "QFN, 16-Leads, Body 3x3mm, Pitch 0.50mm, Thermal Pad 1.70x1.70mm. Compliant to JEDEC standards MO-220-VEED-4"
height 0.75
pads (17):
  rect 0.7x0.25 smd mask+0.05: 1(-1.445,0.75) 2(-1.445,0.25) 3(-1.445,-0.25) 4(-1.445,-0.75) 9(1.445,-0.75) 10(1.445,-0.25) 11(1.445,0.25) 12(1.445,0.75)
  rect 0.25x0.7 smd mask+0.05: 5(-0.75,-1.445) 6(-0.25,-1.445) 7(0.25,-1.445) 8(0.75,-1.445) 13(0.75,1.445) 14(0.25,1.445) 15(-0.25,1.445) 16(-0.75,1.445)
  rect 1.7x1.7 smd paste-5 mask+0.07: EP(0,0)
Top Overlay:
  circle w0.25: c-2.15,1.55 r0.1
  lines w0.2: -1.72,-1.275 -1.72,-1.73 -1.275,-1.73 ; -1.72,1.275 -1.72,1.73 -1.275,1.73 ; 1.275,-1.73 1.72,-1.73 1.72,-1.275 ; 1.275,1.73 1.72,1.73 1.72,1.275
Top Paste:
  region: 0.7,0.7 0.1,0.7 0.1,0.1 0.7,0.1
  region: 0.7,-0.1 0.1,-0.1 0.1,-0.7 0.7,-0.7
  rectangle: -0.7,-0.7 -0.1,-0.1
  rectangle: -0.7,0.1 -0.1,0.7
Top Courtyard:
  lines w0.025: -2.05,-1.15 -2.05,1.15 -1.7,1.15 -1.7,1.7 -1.15,1.7 -1.15,2.05 1.15,2.05 1.15,1.7 1.7,1.7 1.7,1.15 2.05,1.15 2.05,-1.15 1.7,-1.15 1.7,-1.7 1.15,-1.7 1.15,-2.05 -1.15,-2.05 -1.15,-1.7 -1.7,-1.7 -1.7,-1.15 -2.05,-1.15
Top Assembly:
  circle w0.05: c-1.1,1.1 r0.2
  lines w0.05: -1.5,-0.875 -1.52,-0.875 -1.52,-0.625 -1.5,-0.625 ; -1.5,-0.375 -1.52,-0.375 -1.52,-0.125 -1.5,-0.125 ; -1.5,0.125 -1.52,0.125 -1.52,0.375 -1.5,0.375 ; -1.5,0.625 -1.52,0.625 -1.52,0.875 -1.5,0.875 ; -0.875,-1.5 -0.875,-1.52 -0.625,-1.52 -0.625,-1.5 ; -0.875,1.5 -0.875,1.52 -0.625,1.52 -0.625,1.5 ; -0.375,-1.5 -0.375,-1.52 -0.125,-1.52 -0.125,-1.5 ; -0.375,1.5 -0.375,1.52 -0.125,1.52 -0.125,1.5 ; 0.125,-1.5 0.125,-1.52 0.375,-1.52 0.375,-1.5 ; 0.125,1.5 0.125,1.52 0.375,1.52 0.375,1.5 ; 0.625,-1.5 0.625,-1.52 0.875,-1.52 0.875,-1.5 ; 0.625,1.5 0.625,1.52 0.875,1.52 0.875,1.5 ; 1.5,-0.875 1.52,-0.875 1.52,-0.625 1.5,-0.625 ; 1.5,-0.375 1.52,-0.375 1.52,-0.125 1.5,-0.125 ; 1.5,0.125 1.52,0.125 1.52,0.375 1.5,0.375 ; 1.5,0.625 1.52,0.625 1.52,0.875 1.5,0.875 ; -1.5,-1.5 1.5,-1.5 1.5,1.5 -1.5,1.5 -1.5,-1.5
  text ".Designator" at -4.511,-0.453 h2
3D body "HCP-16-1.x_t": height 0.9, standoff 0, extent -1.525,-1.525 1.525,1.525

## HCP-40-1 [mm] "QFN, 40-Leads, Body 6x6mm, Pitch 0.50mm, Thermal Pad 4.70x4.70mm. Compliant to JEDEC standards MO-220-VJJD-5"
height 0.9
pads (41):
  rect 1x0.25 smd mask+0.05: 1(-3.075,2.25)
  rrect70% 1x0.25 smd mask+0.05: 2(-3.075,1.75) 3(-3.075,1.25) 4(-3.075,0.75) 5(-3.075,0.25) 6(-3.075,-0.25) 7(-3.075,-0.75) 8(-3.075,-1.25) 9(-3.075,-1.75) 10(-3.075,-2.25) 21(3.1,-2.25) 22(3.1,-1.75) 23(3.1,-1.25) 24(3.1,-0.75) 25(3.1,-0.25) 26(3.1,0.25) 27(3.1,0.75) 28(3.1,1.25) 29(3.1,1.75) 30(3.1,2.25)
  rrect70% 0.25x1 smd mask+0.05: 11(-2.25,-3.1) 12(-1.75,-3.1) 13(-1.25,-3.1) 14(-0.75,-3.1) 15(-0.25,-3.1) 16(0.25,-3.1) 17(0.75,-3.1) 18(1.25,-3.1) 19(1.75,-3.1) 20(2.25,-3.1) 31(2.25,3.1) 32(1.75,3.1) 33(1.25,3.1) 34(0.75,3.1) 35(0.25,3.1) 36(-0.25,3.1) 37(-0.75,3.1) 38(-1.25,3.1) 39(-1.75,3.1) 40(-2.25,3.1)
  rrect10% 4.7x4.7 smd paste-5 mask+0.05: EP(0,0)
Top Overlay:
  circle w0.25: c-3.9,3 r0.125
  lines w0.2: -3.2,-2.8 -3.2,-3.2 -2.8,-3.2 ; -3.2,2.8 -3.2,3.2 -2.8,3.2 ; 2.8,-3.2 3.2,-3.2 3.2,-2.8 ; 2.8,3.2 3.2,3.2 3.2,2.8
Top Paste:
  region: 0.6,-0.1 0.1,-0.1 0.1,-0.6 0.6,-0.6
  rectangle: -0.6,-0.6 -0.1,-0.1
  region: 0.6,0.6 0.1,0.6 0.1,0.1 0.6,0.1
  rectangle: -0.6,0.1 -0.1,0.6
  region: 1.3,-0.1 0.8,-0.1 0.8,-0.6 1.3,-0.6
  region: 2,-0.1 1.5,-0.1 1.5,-0.6 2,-0.6
  region: 1.3,0.6 0.8,0.6 0.8,0.1 1.3,0.1
  region: 2,0.6 1.5,0.6 1.5,0.1 2,0.1
  rectangle: -1.3,0.1 -0.8,0.6
  rectangle: -2,0.1 -1.5,0.6
  rectangle: -1.3,-0.6 -0.8,-0.1
  rectangle: -2,-0.6 -1.5,-0.1
  region: -1.5,-1.3 -1.5,-0.8 -2,-0.8 -2,-1.3
  region: -0.8,-1.3 -0.8,-0.8 -1.3,-0.8 -1.3,-1.3
  region: -0.1,-1.3 -0.1,-0.8 -0.6,-0.8 -0.6,-1.3
  region: 0.6,-1.3 0.6,-0.8 0.1,-0.8 0.1,-1.3
  region: 1.3,-1.3 1.3,-0.8 0.8,-0.8 0.8,-1.3
  region: 2,-1.3 2,-0.8 1.5,-0.8 1.5,-1.3
  region: -1.5,-2 -1.5,-1.5 -2,-1.5 -2,-2
  region: -0.8,-2 -0.8,-1.5 -1.3,-1.5 -1.3,-2
  region: -0.1,-2 -0.1,-1.5 -0.6,-1.5 -0.6,-2
  region: 0.6,-2 0.6,-1.5 0.1,-1.5 0.1,-2
  region: 1.3,-2 1.3,-1.5 0.8,-1.5 0.8,-2
  region: 2,-2 2,-1.5 1.5,-1.5 1.5,-2
  region: -2,1.3 -2,0.8 -1.5,0.8 -1.5,1.3
  region: -2,2 -2,1.5 -1.5,1.5 -1.5,2
  region: -1.3,1.3 -1.3,0.8 -0.8,0.8 -0.8,1.3
  region: -0.6,1.3 -0.6,0.8 -0.1,0.8 -0.1,1.3
  region: 0.1,1.3 0.1,0.8 0.6,0.8 0.6,1.3
  region: 0.8,1.3 0.8,0.8 1.3,0.8 1.3,1.3
  region: 1.5,1.3 1.5,0.8 2,0.8 2,1.3
  region: -1.3,2 -1.3,1.5 -0.8,1.5 -0.8,2
  region: -0.6,2 -0.6,1.5 -0.1,1.5 -0.1,2
  region: 0.1,2 0.1,1.5 0.6,1.5 0.6,2
  region: 0.8,2 0.8,1.5 1.3,1.5 1.3,2
  region: 1.5,2 1.5,1.5 2,1.5 2,2
Top Courtyard:
  lines w0.025: -3.85,-2.65 -3.85,2.65 -3.2,2.65 -3.2,3.2 -2.65,3.2 -2.65,3.85 2.65,3.85 2.65,3.2 3.2,3.2 3.2,2.65 3.85,2.65 3.85,-2.65 3.2,-2.65 3.2,-3.2 2.65,-3.2 2.65,-3.85 -2.65,-3.85 -2.65,-3.2 -3.2,-3.2 -3.2,-2.65 -3.85,-2.65
Top Assembly:
  circle w0.05: c-2.5,2.5 r0.25
  lines w0.05: -3,-2.375 -3.025,-2.375 -3.025,-2.125 -3,-2.125 ; -3,-1.875 -3.025,-1.875 -3.025,-1.625 -3,-1.625 ; -3,-1.375 -3.025,-1.375 -3.025,-1.125 -3,-1.125 ; -3,-0.875 -3.025,-0.875 -3.025,-0.625 -3,-0.625 ; -3,-0.375 -3.025,-0.375 -3.025,-0.125 -3,-0.125 ; -3,0.125 -3.025,0.125 -3.025,0.375 -3,0.375 ; -3,0.625 -3.025,0.625 -3.025,0.875 -3,0.875 ; -3,1.125 -3.025,1.125 -3.025,1.375 -3,1.375 ; -3,1.625 -3.025,1.625 -3.025,1.875 -3,1.875 ; -3,2.125 -3.025,2.125 -3.025,2.375 -3,2.375 ; -2.375,-3 -2.375,-3.025 -2.125,-3.025 -2.125,-3 ; -2.375,3 -2.375,3.025 -2.125,3.025 -2.125,3 ; -1.875,-3 -1.875,-3.025 -1.625,-3.025 -1.625,-3 ; -1.875,3 -1.875,3.025 -1.625,3.025 -1.625,3 ; -1.375,-3 -1.375,-3.025 -1.125,-3.025 -1.125,-3 ; -1.375,3 -1.375,3.025 -1.125,3.025 -1.125,3 ; -0.875,-3 -0.875,-3.025 -0.625,-3.025 -0.625,-3 ; -0.875,3 -0.875,3.025 -0.625,3.025 -0.625,3 ; -0.375,-3 -0.375,-3.025 -0.125,-3.025 -0.125,-3 ; -0.375,3 -0.375,3.025 -0.125,3.025 -0.125,3 ; 0.125,-3 0.125,-3.025 0.375,-3.025 0.375,-3 ; 0.125,3 0.125,3.025 0.375,3.025 0.375,3 ; 0.625,-3 0.625,-3.025 0.875,-3.025 0.875,-3 ; 0.625,3 0.625,3.025 0.875,3.025 0.875,3 ; 1.125,-3 1.125,-3.025 1.375,-3.025 1.375,-3 ; 1.125,3 1.125,3.025 1.375,3.025 1.375,3 ; 1.625,-3 1.625,-3.025 1.875,-3.025 1.875,-3 ; 1.625,3 1.625,3.025 1.875,3.025 1.875,3 ; 2.125,-3 2.125,-3.025 2.375,-3.025 2.375,-3 ; 2.125,3 2.125,3.025 2.375,3.025 2.375,3 ; 3,-2.375 3.025,-2.375 3.025,-2.125 3,-2.125 ; 3,-1.875 3.025,-1.875 3.025,-1.625 3,-1.625 ; 3,-1.375 3.025,-1.375 3.025,-1.125 3,-1.125 ; 3,-0.875 3.025,-0.875 3.025,-0.625 3,-0.625 ; 3,-0.375 3.025,-0.375 3.025,-0.125 3,-0.125 ; 3,0.125 3.025,0.125 3.025,0.375 3,0.375 ; 3,0.625 3.025,0.625 3.025,0.875 3,0.875 ; 3,1.125 3.025,1.125 3.025,1.375 3,1.375 ; 3,1.625 3.025,1.625 3.025,1.875 3,1.875 ; 3,2.125 3.025,2.125 3.025,2.375 3,2.375 ; -3,-3 -3,3 3,3 3,-3 -3,-3
  text ".Designator" at -3.378,-0.339 h1.5
3D body "HCP-40-1.x_t": height 0.9, standoff 0, extent -3.025,-3.025 3.025,3.025

## HTSSOP28_PWP0028C [mm] "HTSSOP, 28-Leads, Pitch 0.65mm"
height 1.2
pads (29):
  rect 1.5x0.4 smd paste+0 mask+0.05: 1(-2.9,4.225)
  oval 1.5x0.4 smd paste+0 mask+0.05: 2(-2.9,3.575) 3(-2.9,2.925) 4(-2.9,2.275) 5(-2.9,1.625) 6(-2.9,0.975) 7(-2.9,0.325) 8(-2.9,-0.325) 9(-2.9,-0.975) 10(-2.9,-1.625) 11(-2.9,-2.275) 12(-2.9,-2.925) 13(-2.9,-3.575) 14(-2.9,-4.225) 15(2.9,-4.225) 16(2.9,-3.575) 17(2.9,-2.925) 18(2.9,-2.275) 19(2.9,-1.625) 20(2.9,-0.975) 21(2.9,-0.325) 22(2.9,0.325) 23(2.9,0.975) 24(2.9,1.625) 25(2.9,2.275) 26(2.9,2.925) 27(2.9,3.575) 28(2.9,4.225)
  rect 3.1x5.18 smd paste-5 mask+0.05: EP(0,0)
Top Overlay:
  circle w0.25: c-2.8,5 r0.125
  region: -1.85,4.7 -1.85,3.7 -0.85,3.7 -0.85,4.7
  lines w0.2: -1.85,-4.7 -1.85,4.7 1.85,4.7 1.85,-4.7 -1.85,-4.7
Top Paste:
  rectangle: 0.65,-2.35 1.35,-1.65
  rectangle: -0.35,-2.35 0.35,-1.65
  rectangle: 0.65,-1.35 1.35,-0.65
  rectangle: -0.35,-1.35 0.35,-0.65
  rectangle: 0.65,-0.35 1.35,0.35
  rectangle: -0.35,-0.35 0.35,0.35
  rectangle: 0.65,0.65 1.35,1.35
  rectangle: -0.35,0.65 0.35,1.35
  rectangle: 0.65,1.65 1.35,2.35
  rectangle: -0.35,1.65 0.35,2.35
  rectangle: -1.35,-2.35 -0.65,-1.65
  rectangle: -1.35,-1.35 -0.65,-0.65
  rectangle: -1.35,-0.35 -0.65,0.35
  rectangle: -1.35,0.65 -0.65,1.35
  rectangle: -1.35,1.65 -0.65,2.35
Top Courtyard:
  lines w0.025: -3.85,-5.05 3.85,-5.05 3.85,5.05 -3.85,5.05 -3.85,-5.05
Top Assembly:
  drawing of 453 lines, arcs and shapes, not listed
  text ".Designator" at 0.453,-4.511 h2
3D body "HTSSOP28_LM5175PWP.x_t": height 1.2, standoff 0, extent -3.2,-4.85 3.2,4.85

## LCC12_CMD285C3 [mm] "LCC, 12-Leads, Body 2.9x2.9mm, Pitch 0.50mm, Thermal Pad 1.50x1.50mm"
height 0.8
pads (13):
  rect 0.82x0.3 smd mask+0.06: 1(-1.46,0.5) 2(-1.46,0) 3(-1.46,-0.5) 7(1.46,-0.5) 8(1.46,0) 9(1.46,0.5)
  rect 0.3x0.82 smd mask+0.06: 4(-0.5,-1.46) 5(0,-1.46) 6(0.5,-1.46) 10(0.5,1.46) 11(0,1.46) 12(-0.5,1.46)
  rect 1.5x1.5 smd paste-5 mask+0.092: EP(0,0)
Top Overlay:
  circle w0.25: c-2.2,1.4 r0.125
  lines w0.2: -1.67,-1.045 -1.67,-1.67 -1.045,-1.67 ; -1.67,1.045 -1.67,1.67 -1.045,1.67 ; 1.045,-1.67 1.67,-1.67 1.67,-1.045 ; 1.045,1.67 1.67,1.67 1.67,1.045
Top Paste:
  rectangle: -0.7,0.1 -0.1,0.7
  region: 0.7,0.7 0.1,0.7 0.1,0.1 0.7,0.1
  rectangle: -0.7,-0.7 -0.1,-0.1
  region: 0.7,-0.1 0.1,-0.1 0.1,-0.7 0.7,-0.7
Top Courtyard:
  lines w0.025: -2.15,-0.9 -2.15,0.9 -1.65,0.9 -1.65,1.65 -0.9,1.65 -0.9,2.15 0.9,2.15 0.9,1.65 1.65,1.65 1.65,0.9 2.15,0.9 2.15,-0.9 1.65,-0.9 1.65,-1.65 0.9,-1.65 0.9,-2.15 -0.9,-2.15 -0.9,-1.65 -1.65,-1.65 -1.65,-0.9 -2.15,-0.9
Top Assembly:
  circle w0.05: c-1.05,1.05 r0.15
  lines w0.05: -1.45,-1.45 0,-1.45 1.45,-1.45 1.45,0 1.45,1.45 0,1.45 -1.45,1.45 -1.45,0 -1.45,-1.45
  text ".Designator" at -4.511,-0.453 h2
3D body "CMD285C3.x_t": height 0.8, standoff -0.01, extent -1.45,-1.45 1.45,1.45

## LCC-24(E-24-1) [mm] "24-Leads, Body 4,00x4,00mm, Pitch 0,50mm, Thermal Pad 2.5x2.5mm, IPC Medium Density"
height 1
pads (25):
  round 0.025 smd paste+0 mask-5: 1(-1.8,1.25) 2(-1.8,0.75) 3(-1.8,0.25) 4(-1.8,-0.25) 5(-1.8,-0.75) 6(-1.8,-1.25) 7(-1.25,-1.8) 8(-0.75,-1.8) 9(-0.25,-1.8) 10(0.25,-1.8) 11(0.75,-1.8) 12(1.25,-1.8) 13(1.8,-1.25) 14(1.8,-0.75) 15(1.8,-0.25) 16(1.8,0.25) 17(1.8,0.75) 18(1.8,1.25) 19(1.25,1.8) 20(0.75,1.8) 21(0.25,1.8) 22(-0.25,1.8) 23(-0.75,1.8) 24(-1.25,1.8)
  rect 2.5x2.5 smd paste-5 mask+0.09: EP(0,0)
Top Layer:
  region: -1.4,2.05 -1.4,1.55 -1.1,1.55 -1.1,2.05
  region: -0.9,2.05 -0.9,1.55 -0.6,1.55 -0.6,2.05
  region: -0.4,2.05 -0.4,1.55 -0.1,1.55 -0.1,2.05
  region: 0.1,2.05 0.1,1.55 0.4,1.55 0.4,2.05
  region: 0.6,2.05 0.6,1.55 0.9,1.55 0.9,2.05
  region: 1.1,2.05 1.1,1.55 1.4,1.55 1.4,2.05
  region: 2.05,1.4 1.55,1.4 1.55,1.1 2.05,1.1
  region: 2.05,0.9 1.55,0.9 1.55,0.6 2.05,0.6
  region: 2.05,0.4 1.55,0.4 1.55,0.1 2.05,0.1
  region: 2.05,-0.1 1.55,-0.1 1.55,-0.4 2.05,-0.4
  region: 2.05,-0.6 1.55,-0.6 1.55,-0.9 2.05,-0.9
  region: 2.05,-1.1 1.55,-1.1 1.55,-1.4 2.05,-1.4
  region: 1.4,-2.05 1.4,-1.55 1.1,-1.55 1.1,-2.05
  region: 0.9,-2.05 0.9,-1.55 0.6,-1.55 0.6,-2.05
  region: 0.4,-2.05 0.4,-1.55 0.1,-1.55 0.1,-2.05
  region: -0.1,-2.05 -0.1,-1.55 -0.4,-1.55 -0.4,-2.05
  region: -0.6,-2.05 -0.6,-1.55 -0.9,-1.55 -0.9,-2.05
  region: -1.1,-2.05 -1.1,-1.55 -1.4,-1.55 -1.4,-2.05
  region: -2.05,-1.4 -1.55,-1.4 -1.55,-1.1 -2.05,-1.1
  region: -2.05,-0.9 -1.55,-0.9 -1.55,-0.6 -2.05,-0.6
  region: -2.05,-0.4 -1.55,-0.4 -1.55,-0.1 -2.05,-0.1
  region: -2.05,0.1 -1.55,0.1 -1.55,0.4 -2.05,0.4
  region: -2.05,1.1 -1.55,1.1 -1.55,1.4 -2.05,1.4
  region: -2.05,0.6 -1.55,0.6 -1.55,0.9 -2.05,0.9
Top Overlay:
  circle w0.25: c-2.7,1.9 r0.125
  lines w0.2: -2.05,-1.825 -2.05,-2.05 -1.825,-2.05 ; -2.05,1.825 -2.05,2.05 -1.825,2.05 ; 1.825,-2.05 2.05,-2.05 2.05,-1.825 ; 1.825,2.05 2.05,2.05 2.05,1.825
Top Paste:
  rectangle: -1.225,0.575 -0.575,1.225
  rectangle: -0.325,0.575 0.325,1.225
  rectangle: 0.575,0.575 1.225,1.225
  region: -1.225,0.325 -1.225,-0.325 -0.575,-0.325 -0.575,0.325
  region: -1.225,-0.575 -1.225,-1.225 -0.575,-1.225 -0.575,-0.575
  region: -0.325,0.325 -0.325,-0.325 0.325,-0.325 0.325,0.325
  region: -0.325,-0.575 -0.325,-1.225 0.325,-1.225 0.325,-0.575
  region: 0.575,0.325 0.575,-0.325 1.225,-0.325 1.225,0.325
  region: 0.575,-0.575 0.575,-1.225 1.225,-1.225 1.225,-0.575
Top Solder:
  region: -1.5,1.05 -1.5,1.45 -2.1,1.45 -2.1,1.05
  region: -1.5,0.55 -1.5,0.95 -2.1,0.95 -2.1,0.55
  region: -1.5,0.05 -1.5,0.45 -2.1,0.45 -2.1,0.05
  region: -1.5,-0.45 -1.5,-0.05 -2.1,-0.05 -2.1,-0.45
  region: -1.5,-0.95 -1.5,-0.55 -2.1,-0.55 -2.1,-0.95
  region: -1.5,-1.45 -1.5,-1.05 -2.1,-1.05 -2.1,-1.45
  region: -1.05,-1.5 -1.45,-1.5 -1.45,-2.1 -1.05,-2.1
  region: -0.55,-1.5 -0.95,-1.5 -0.95,-2.1 -0.55,-2.1
  region: -0.05,-1.5 -0.45,-1.5 -0.45,-2.1 -0.05,-2.1
  region: 0.45,-1.5 0.05,-1.5 0.05,-2.1 0.45,-2.1
  region: 0.95,-1.5 0.55,-1.5 0.55,-2.1 0.95,-2.1
  region: 1.45,-1.5 1.05,-1.5 1.05,-2.1 1.45,-2.1
  region: 1.5,-1.05 1.5,-1.45 2.1,-1.45 2.1,-1.05
  region: 1.5,-0.55 1.5,-0.95 2.1,-0.95 2.1,-0.55
  region: 1.5,-0.05 1.5,-0.45 2.1,-0.45 2.1,-0.05
  region: 1.5,0.45 1.5,0.05 2.1,0.05 2.1,0.45
  region: 1.5,0.95 1.5,0.55 2.1,0.55 2.1,0.95
  region: 1.5,1.45 1.5,1.05 2.1,1.05 2.1,1.45
  region: 1.05,1.5 1.45,1.5 1.45,2.1 1.05,2.1
  region: 0.55,1.5 0.95,1.5 0.95,2.1 0.55,2.1
  region: 0.05,1.5 0.45,1.5 0.45,2.1 0.05,2.1
  region: -0.45,1.5 -0.05,1.5 -0.05,2.1 -0.45,2.1
  region: -0.95,1.5 -0.55,1.5 -0.55,2.1 -0.95,2.1
  region: -1.45,1.5 -1.05,1.5 -1.05,2.1 -1.45,2.1
Top Courtyard:
  lines w0.025: -2.5,-1.65 -2.5,1.65 -2.2,1.65 -2.2,2.2 -1.65,2.2 -1.65,2.5 1.65,2.5 1.65,2.2 2.2,2.2 2.2,1.65 2.5,1.65 2.5,-1.65 2.2,-1.65 2.2,-2.2 1.65,-2.2 1.65,-2.5 -1.65,-2.5 -1.65,-2.2 -2.2,-2.2 -2.2,-1.65 -2.5,-1.65
Top Assembly:
  circle w0.05: c-1.45,1.45 r0.25
  lines w0.05: -1.95,-1.95 1.95,-1.95 1.95,1.95 -1.95,1.95 -1.95,-1.95
  text ".Designator" at -2.815,-0.283 h1.25
3D body "LCC24_E24_1.x_t": height 1.03, standoff 0, extent -1.95,-1.95 1.95,1.95

## LCC-32(E-32-1) [mm] "LCC, 32-Leads, Body 4.9x4.9mm, Pitch 0.50mm, Thermal Pad 3.50x3.50mm"
height 1.1
pads (33):
  rect 0.6x0.3 smd mask+0.05: 1(-2.35,1.75) 2(-2.35,1.25) 3(-2.35,0.75) 4(-2.35,0.25) 5(-2.35,-0.25) 6(-2.35,-0.75) 7(-2.35,-1.25) 8(-2.35,-1.75) 17(2.35,-1.75) 18(2.35,-1.25) 19(2.35,-0.75) 20(2.35,-0.25) 21(2.35,0.25) 22(2.35,0.75) 23(2.35,1.25) 24(2.35,1.75)
  rect 0.3x0.6 smd mask+0.05: 9(-1.75,-2.35) 10(-1.25,-2.35) 11(-0.75,-2.35) 12(-0.25,-2.35) 13(0.25,-2.35) 14(0.75,-2.35) 15(1.25,-2.35) 16(1.75,-2.35) 25(1.75,2.35) 26(1.25,2.35) 27(0.75,2.35) 28(0.25,2.35) 29(-0.25,2.35) 30(-0.75,2.35) 31(-1.25,2.35) 32(-1.75,2.35)
  rect 3.5x3.5 smd paste-5 mask+0.07: EP(0,0)
Top Overlay:
  circle w0.25: c-3.2,2.2 r0.125
  lines w0.2: -2.725,-2.4 -2.725,-2.725 -2.4,-2.725 ; -2.725,2.4 -2.725,2.725 -2.4,2.725 ; 2.4,-2.725 2.725,-2.725 2.725,-2.4 ; 2.4,2.725 2.725,2.725 2.725,2.4
Top Paste:
  rectangle: -0.95,0.45 -0.45,0.95
  rectangle: -0.25,0.45 0.25,0.95
  rectangle: 0.45,0.45 0.95,0.95
  rectangle: 1.15,0.45 1.65,0.95
  rectangle: -0.95,-0.25 -0.45,0.25
  rectangle: -0.25,-0.25 0.25,0.25
  rectangle: 0.45,-0.25 0.95,0.25
  rectangle: 1.15,-0.25 1.65,0.25
  rectangle: -0.95,-0.95 -0.45,-0.45
  rectangle: -0.25,-0.95 0.25,-0.45
  rectangle: 0.45,-0.95 0.95,-0.45
  rectangle: 1.15,-0.95 1.65,-0.45
  rectangle: -0.95,1.15 -0.45,1.65
  rectangle: -0.25,1.15 0.25,1.65
  rectangle: 0.45,1.15 0.95,1.65
  rectangle: 1.15,1.15 1.65,1.65
  rectangle: -1.65,1.15 -1.15,1.65
  rectangle: -0.95,-1.65 -0.45,-1.15
  rectangle: -0.25,-1.65 0.25,-1.15
  rectangle: 0.45,-1.65 0.95,-1.15
  rectangle: 1.15,-1.65 1.65,-1.15
  region: -1.65,0.95 -1.65,0.45 -1.15,0.45 -1.15,0.95
  region: -1.65,0.25 -1.65,-0.25 -1.15,-0.25 -1.15,0.25
  region: -1.65,-0.45 -1.65,-0.95 -1.15,-0.95 -1.15,-0.45
  region: -1.65,-1.15 -1.65,-1.65 -1.15,-1.65 -1.15,-1.15
Top Courtyard:
  lines w0.025: -3,-2.15 -2.7,-2.15 -2.7,-2.7 -2.15,-2.7 -2.15,-3 2.15,-3 2.15,-2.7 2.7,-2.7 2.7,-2.15 3,-2.15 3,2.15 2.7,2.15 2.7,2.7 2.15,2.7 2.15,3 -2.15,3 -2.15,2.7 -2.7,2.7 -2.7,2.15 -3,2.15 -3,-2.15
Top Assembly:
  circle w0.05: c-2,2 r0.25
  lines w0.05: -2.5,-2.5 -2.5,2.5 ; -2.5,-2.496 2.5,-2.496 2.5,2.504 -2.5,2.504
  text ".Designator" at -4.511,-0.453 h2
3D body "E-32-1.x_t": height 1, standoff -0.01, extent -2.45,-2.45 2.45,2.45

## LCC_HS-16(EH-16-1) [mil] "16-Terminal Ceramic Leadless Chip Carrier with Heat Sink, Thermal Pad 3.55x3.55mm"
height 51.85
pads (21):
  round 1 smd mask+1.97: 1(-99.41,39.37) 2(-99.41,0) 3(-99.41,-39.37) 4(-67.91,-99.41) 5(-32.48,-94.49) 6(0,-97.44) 7(32.48,-94.49) 8(67.91,-99.41) 9(99.41,-39.37) 10(99.41,0) 11(99.41,39.37) 12(67.91,99.41) 13(32.48,94.49) 14(0,97.44) 15(-32.48,94.49) 16(-67.91,99.41) EP(-103.35,-91.04) EP(-103.35,91.04) EP(103.35,-91.04) EP(103.35,91.04)
  round 1 smd paste-196.85 mask+1.97: EP(0,0)
Top Layer:
  region: -69.88,-69.88 -69.88,69.88 69.88,69.88 69.88,-69.88
  region: -91.54,115.16 -91.54,66.93 -115.16,66.93 -115.16,115.16
  region: -91.54,-115.16 -91.54,-66.93 -115.16,-66.93 -115.16,-115.16
  region: 91.54,115.16 91.54,66.93 115.16,66.93 115.16,115.16
  region: 91.54,-115.16 91.54,-66.93 115.16,-66.93 115.16,-115.16
  region: -58.07,-115.16 -77.76,-115.16 -77.76,-83.66 -58.07,-83.66
  region: 58.07,-115.16 77.76,-115.16 77.76,-83.66 58.07,-83.66
  region: -4.92,-115.16 4.92,-115.16 4.92,-79.72 -4.92,-79.72
  region: 58.07,115.16 77.76,115.16 77.76,83.66 58.07,83.66
  region: -58.07,115.16 -77.76,115.16 -77.76,83.66 -58.07,83.66
  region: 115.16,49.21 115.16,29.53 83.66,29.53 83.66,49.21
  region: 115.16,9.84 115.16,-9.84 83.66,-9.84 83.66,9.84
  region: 115.16,-29.53 115.16,-49.21 83.66,-49.21 83.66,-29.53
  region: -115.16,-49.21 -115.16,-29.53 -83.66,-29.53 -83.66,-49.21
  region: -115.16,-9.84 -115.16,9.84 -83.66,9.84 -83.66,-9.84
  region: -115.16,29.53 -115.16,49.21 -83.66,49.21 -83.66,29.53
  region: 4.92,115.16 -4.92,115.16 -4.92,79.72 4.92,79.72
  region: -42.52,-115.16 -42.52,-73.82 -22.44,-73.82 -22.44,-115.16
  region: 42.52,-115.16 42.52,-73.82 22.44,-73.82 22.44,-115.16
  region: 42.52,115.16 42.52,73.82 22.44,73.82 22.44,115.16
  region: -42.52,115.16 -42.52,73.82 -22.44,73.82 -22.44,115.16
Top Overlay:
  circle w7.87: c-142.35,120.8 r3.74
  lines w7.87: -128.15,110.23 -128.15,127.76 -110.23,127.76 ; -127.76,-110.23 -127.76,-128.15 -110.23,-128.15 ; 110.23,-127.76 128.15,-127.76 128.15,-110.23 ; 110.23,127.76 128.15,127.76 128.15,110.23
Top Paste:
  region: -18.7,-28.54 -18.7,-65.95 18.7,-65.95 18.7,-28.54
  region: -18.7,18.7 -18.7,-18.7 18.7,-18.7 18.7,18.7
  region: 28.54,-28.54 28.54,-65.95 65.95,-65.95 65.95,-28.54
  region: 28.54,18.7 28.54,-18.7 65.95,-18.7 65.95,18.7
  rectangle: 28.54,28.54 65.95,65.94
  rectangle: -18.7,28.54 18.7,65.94
  region: -65.94,-28.54 -65.94,-65.95 -28.54,-65.95 -28.54,-28.54
  region: -65.94,18.7 -65.94,-18.7 -28.54,-18.7 -28.54,18.7
  rectangle: -65.94,28.54 -28.54,65.94
Top Courtyard:
  lines w0.98: -145.67,-61.02 -145.67,61.02 -127.95,61.02 -127.95,137.8 -88.58,137.8 -88.58,145.67 88.58,145.67 88.58,137.8 127.95,137.8 127.95,61.02 145.67,61.02 145.67,-61.02 127.95,-61.02 127.95,-137.8 88.58,-137.8 88.58,-145.67 -88.58,-145.67 -88.58,-137.8 -127.95,-137.8 -127.95,-61.02 -145.67,-61.02
Top Assembly:
  circle w1.97: c-90.55,90.55 r13.78
  lines w1.97: -118.11,-118.11 118.11,-118.11 118.11,118.11 -118.11,118.11 -118.11,-118.11 ; -114.17,-114.17 114.17,-114.17 114.17,114.17 -114.17,114.17 -114.17,-114.17
  text ".Designator" at -133.01,-13.35 h59.06
3D body "EH-16-1.x_t": height 51.85, standoff 0, extent -118.11,-118.11 118.11,118.11

## LCC_HS-16(EH-16-1)_old [mm] "16-Terminal Ceramic Leadless Chip Carrier with Heat Sink, Thermal Pad 3.55x3.55mm"
height 1.317
pads (21):
  rect 0.8x0.5 smd mask+0.07: 1(-2.7,1) 2(-2.7,0) 3(-2.7,-1) 9(2.7,-1) 10(2.7,0) 11(2.7,1)
  rect 0.5x0.8 smd mask+0.07: 4(-1.725,-2.7) 8(1.725,-2.7) 12(1.725,2.7) 16(-1.725,2.7)
  rect 0.7x1.05 smd mask+0.07: 5(-0.825,-2.58) 7(0.825,-2.58) 13(0.825,2.58) 15(-0.825,2.58)
  rect 0.31x0.9 smd mask+0.07: 6(0,-2.65) 14(0,2.65)
  rect 0.7x1.1 smd paste-5 mask+0.07: EP(-2.6,-2.4) EP(-2.6,2.4) EP(2.6,-2.4) EP(2.6,2.4)
  rect 3.55x3.55 smd paste-5 mask+0.08: EP(0,0)
Top Overlay:
  circle w0.25: c-3.8,3 r0.1
  lines w0.2: -3.2,-2.7 -3.2,-3.2 -2.7,-3.2 ; -3.2,2.7 -3.2,3.2 -2.7,3.2 ; 2.7,-3.2 3.2,-3.2 3.2,-2.7 ; 2.7,3.2 3.2,3.2 3.2,2.7
Top Paste:
  rectangle: -1.7,1 -1,1.7
  rectangle: -0.8,1 -0.1,1.7
  rectangle: 0.1,1 0.8,1.7
  rectangle: 1,1 1.7,1.7
  region: 1,0.8 1,0.1 1.7,0.1 1.7,0.8
  region: 0.1,0.8 0.1,0.1 0.8,0.1 0.8,0.8
  region: -0.8,0.8 -0.8,0.1 -0.1,0.1 -0.1,0.8
  region: -1.7,0.8 -1.7,0.1 -1,0.1 -1,0.8
  region: 1,-0.1 1,-0.8 1.7,-0.8 1.7,-0.1
  region: 0.1,-0.1 0.1,-0.8 0.8,-0.8 0.8,-0.1
  region: -0.8,-0.1 -0.8,-0.8 -0.1,-0.8 -0.1,-0.1
  region: -1.7,-0.1 -1.7,-0.8 -1,-0.8 -1,-0.1
  region: 1,-1 1,-1.7 1.7,-1.7 1.7,-1
  region: 0.1,-1 0.1,-1.7 0.8,-1.7 0.8,-1
  region: -0.8,-1 -0.8,-1.7 -0.1,-1.7 -0.1,-1
  region: -1.7,-1 -1.7,-1.7 -1,-1.7 -1,-1
Top Solder:
  region: 3.16,1.32 3.16,0.68 3.47,0.68 3.47,1.32
  region: 3.16,0.32 3.16,-0.32 3.47,-0.32 3.47,0.32
  region: 3.16,-0.68 3.16,-1.32 3.47,-1.32 3.47,-0.68
  region: 2.045,-3.16 1.405,-3.16 1.405,-3.47 2.045,-3.47
  region: -1.405,-3.16 -2.045,-3.16 -2.045,-3.47 -1.405,-3.47
  region: -3.16,-1.32 -3.16,-0.68 -3.47,-0.68 -3.47,-1.32
  region: -3.16,-0.32 -3.16,0.32 -3.47,0.32 -3.47,-0.32
  region: -3.16,0.68 -3.16,1.32 -3.47,1.32 -3.47,0.68
  region: -2.045,3.16 -1.405,3.16 -1.405,3.47 -2.045,3.47
  region: 1.405,3.16 2.045,3.16 2.045,3.47 1.405,3.47
  region: 0.405,3.17 1.24,3.17 1.24,3.48 0.405,3.48
  region: -1.245,3.17 -0.41,3.17 -0.41,3.48 -1.245,3.48
  region: -3.02,2.99 -2.185,2.99 -2.185,3.3 -3.02,3.3
  region: 2.18,2.99 3.015,2.99 3.015,3.3 2.18,3.3
  region: 2.18,-2.99 3.015,-2.99 3.015,-3.3 2.18,-3.3
  region: 0.405,-3.17 1.24,-3.17 1.24,-3.48 0.405,-3.48
  region: -1.245,-3.17 -0.41,-3.17 -0.41,-3.48 -1.245,-3.48
  region: -3.02,-2.99 -2.185,-2.99 -2.185,-3.3 -3.02,-3.3
  region: 0.225,-3.1 -0.224,-3.1 -0.224,-3.5 0.225,-3.5
  region: 0.225,3.1 -0.224,3.1 -0.224,3.5 0.225,3.5
Top Courtyard:
  lines w0.025: -3.7,-1.55 -3.25,-1.55 -3.25,-3.5 -2.25,-3.5 -2.25,-3.7 2.25,-3.7 2.25,-3.5 3.25,-3.5 3.25,-1.55 3.7,-1.55 3.7,1.55 3.25,1.55 3.25,3.5 2.25,3.5 2.25,3.7 -2.25,3.7 -2.25,3.5 -3.25,3.5 -3.25,1.55 -3.7,1.55 -3.7,-1.55
Top Assembly:
  circle w0.05: c-2.3,2.3 r0.35
  lines w0.05: -3,-3 -3,3 3,3 3,-3 -3,-3 ; -2.9,-2.9 -2.9,2.9 2.9,2.9 2.9,-2.9 -2.9,-2.9
  text ".Designator" at -3.378,-0.339 h1.5
3D body "EH-16-1.x_t": height 1.32, standoff 0, extent -3,-3 3,3